# Altium footprint library Connectors.PcbLib: 305 footprints (part 12 of 20)
Each footprint in its own frame and in the unit in brackets; x right, y up, seen from the top. Pads: shape width x height; smd on the part's side, far side on the other; paste and mask are expansions set on the pad; w line width, h text height; cw(c..) or ccw(c..) is an arc to the next point about the centre after c.
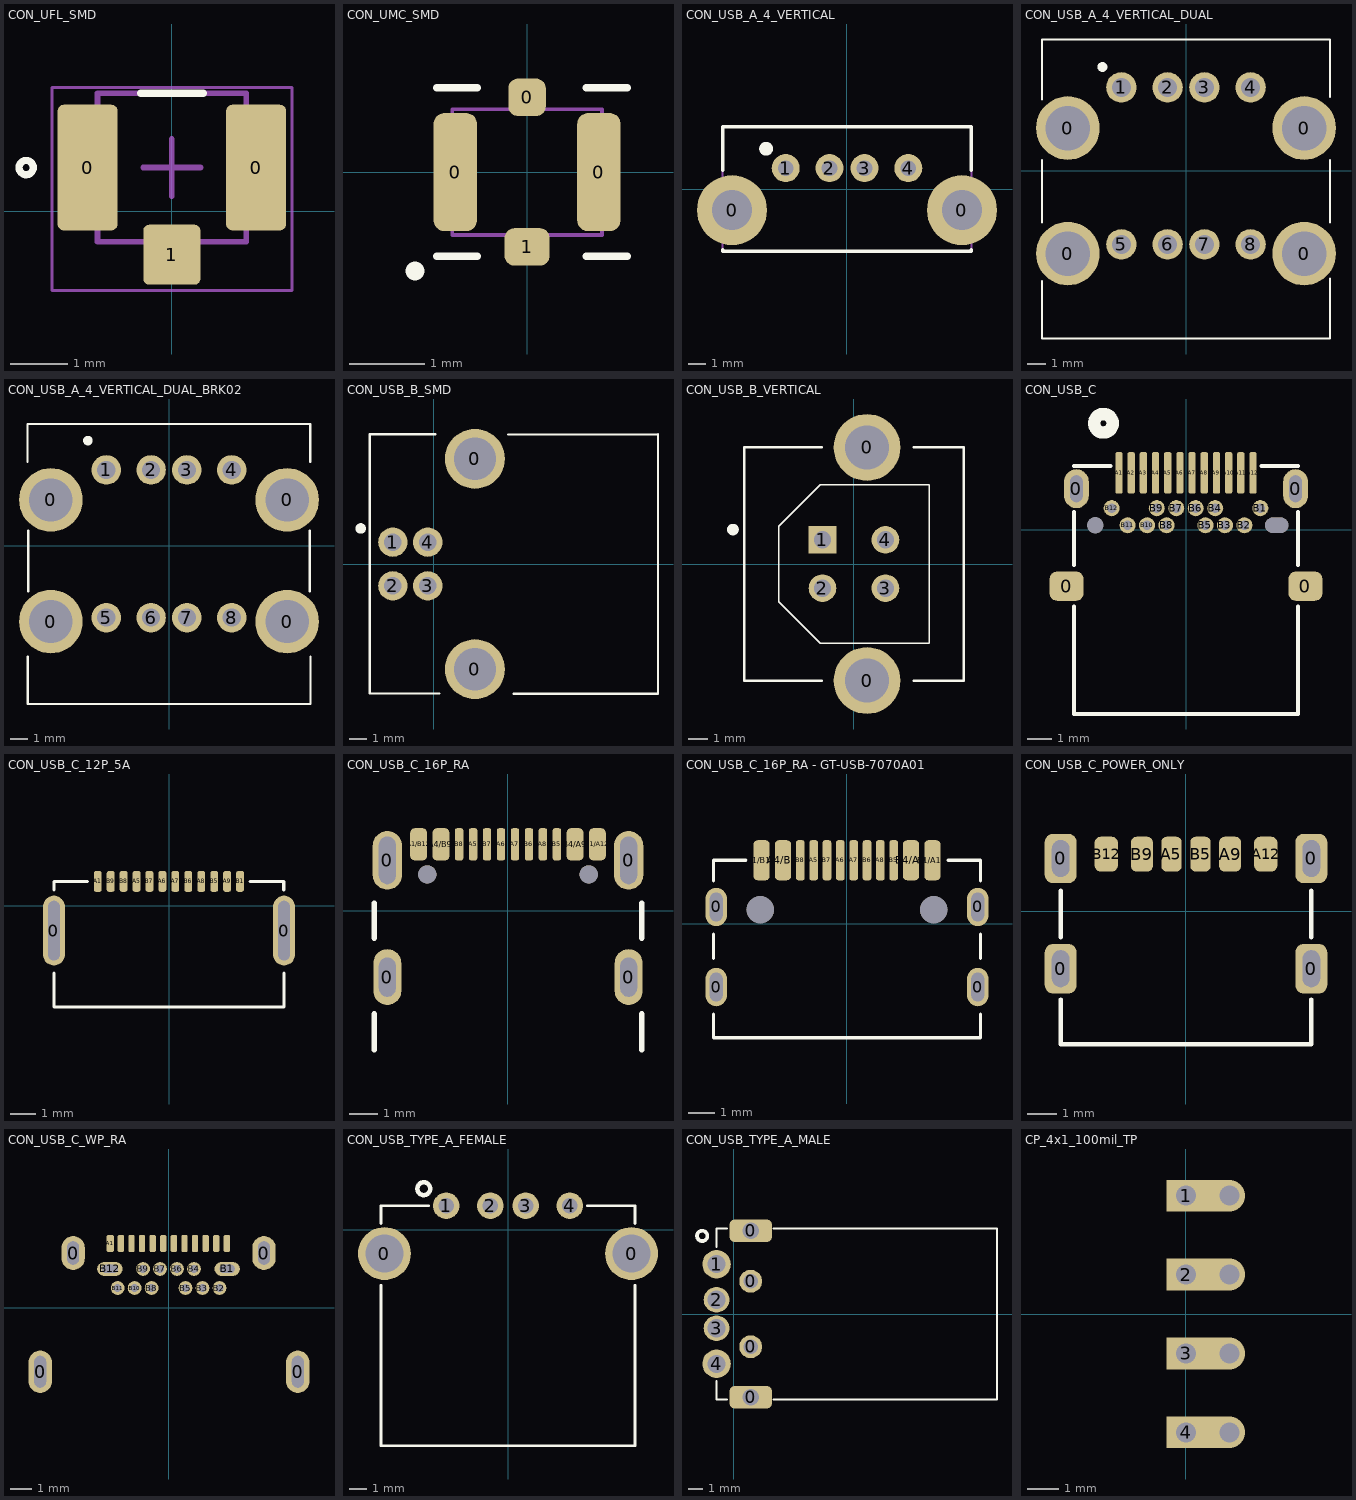
[diagram p11: the footprints below, top view; thin cyan lines are the x and y axes]

## CON_UFL_SMD [mm] "/ 20190503 / M-X.Arias"
pads (3):
  rrect20% 1.05x2.2 smd: 0(-1.475,0.763) 0(1.475,0.763)
  rrect20% 1x1.05 smd: 1(0,-0.762)
Top Overlay:
  circle w0.127: c-2.55,0.763 r0.125
  lines w0.127: -0.55,2.063 0.55,2.063
Mechanical 1:
  lines w0.1: -1.3,-0.537 1.3,-0.537 1.3,2.063 -1.3,2.063 -1.3,-0.537
Mechanical 15:
  lines w0.05: -2.1,-1.387 2.1,-1.387 2.1,2.163 -2.1,2.163 -2.1,-1.387
  lines w0.1: -0.5,0.763 0.5,0.763 ; 0,0.263 0,1.263
3D body: height 0.35, standoff 0, extent -1.3,-0.537 1.3,2.063
3D body: height 1.25, standoff 0, extent -0.992,-0.235 1,1.761

## CON_UMC_SMD [mm] "20211216 / E.Naranjo"
pads (4):
  rrect50% 0.58x1.58 smd: 0(-0.96,0) 0(0.96,0)
  rrect50% 0.5x0.5 smd: 0(0,1)
  rrect50% 0.6x0.5 smd: 1(0,-1)
Top Overlay:
  lines w0.1: -1.208,-1.125 -0.664,-1.125 ; -1.208,1.125 -0.664,1.125 ; 0.792,-1.125 1.336,-1.125 ; 0.792,1.125 1.336,1.125
  lines w0.25: -1.499,-1.322 ccw(c-1.88,-1.321) -1.499,-1.321
Mechanical 1:
  lines w0.05: -1,-0.84 -1,0.84 1,0.84 1,-0.84 -1,-0.84
3D body: height 0.6, standoff 0, extent -1,-0.84 1,0.84

## CON_USB_A_4_VERTICAL [mm] "20210412/M-C.Calderon"
pads (6):
  round 4 hole 2.286: 0(-6.57,-1.2) 0(6.57,-1.2)
  round 1.6 hole 0.889: 1(-3.5,1.2) 2(-1,1.2) 3(1,1.2) 4(3.5,1.2)
Top Overlay:
  circle w0.4: c-4.623,2.305 r0.193
  lines w0.2: -7.112,-3.461 -7.112,-3.562 7.112,-3.562 7.112,-3.461 ; -7.112,1.086 -7.112,3.575 7.112,3.575 7.112,1.086
Top 3D Body (Mech13):
  lines w0.1: -7.112,-3.562 -7.112,3.575 7.112,3.575 7.112,-3.562 -7.112,-3.562
3D body "usb1040-xx-l-b_revb.step": height 13.75, standoff -3.45, extent -7.798,-3.541 7.802,3.579

## CON_USB_A_4_VERTICAL_DUAL [mil] "20230403/N-A.Potosi"
pads (12):
  round 135.83 hole 95: 0(-251.97,-177.17) 0(-251.97,90.55) 0(251.97,-177.17) 0(251.97,90.55)
  round 65 hole 40: 1(-137.79,177.17) 2(-39.38,177.17) 3(39.37,177.17) 4(137.79,177.17) 5(-137.79,-157.48) 6(-39.38,-157.48) 7(39.37,-157.48) 8(137.79,-157.48)
Top Overlay:
  circle w10: c-178.31,220.87 r5.57
  lines w5: -307.09,-236.22 -307.09,-358.27 307.12,-358.27 307.12,-230.51 ; -307.09,-110.24 -307.09,22.64 ; -307.09,151.77 -307.09,279.53 307.12,279.53 307.12,157.48 ; 307.12,-110.24 307.12,22.64
3D body "KUSBVX-AS2N-W-1_A.STEP": height 657.48, standoff -153.54, extent -307.08,-358.26 307.1,279.53

## CON_USB_A_4_VERTICAL_DUAL_BRK02 [mil] "20221118/N-A.Potosi"
pads (12):
  round 140 hole 95: 0(-259.84,-166.79) 0(-259.84,100.93) 0(259.84,-166.79) 0(259.84,100.93)
  round 65 hole 40: 1(-137.79,166.79) 2(-39.38,166.79) 3(39.37,166.79) 4(137.79,166.79) 5(-137.79,-158.01) 6(-39.38,-158.01) 7(39.37,-158.01) 8(137.79,-158.01)
Top Overlay:
  circle w10: c-178.31,231.24 r5.57
  lines w5: -311.3,185.04 -311.3,267.72 310.8,267.72 310.8,185.04 ; -310.6,-244.09 -310.6,-347.89 310.97,-347.89 310.97,-244.09 ; -309.34,-99.86 -309.34,33.01 ; 309.34,-99.86 309.34,33.01
Bottom Overlay:
  circle w10: c-178.47,231.46 r5.57
3D body "690n208-244-021.STEP": height 681.02, standoff -146.46, extent -310.59,-340.81 310.59,274.94

## CON_USB_B_SMD [mil] "/20210831/N-A.Potosi"
pads (6):
  round 135 hole 95: 0(92.5,-237) 0(92.5,237)
  round 66 hole 40: 1(-92.5,49.21) 2(-92.5,-49.21) 3(-13.76,-49.21) 4(-13.76,49.21)
Top Overlay:
  circle w11.81: c-165.02,80 r5.91
  lines w5: 3,292.23 -144.67,292.23 -144.67,-292 12,-292 ; 167,292 504.92,292 504.92,292.23 504.92,-292.22 180.13,-292.22
3D body "USB 2.0 Type B Connector Right Angle (Wurth 61400416121).stp": height 418.61, standoff -147.7, extent -144.67,-292.22 504.92,292.23

## CON_USB_B_VERTICAL [mm] "/20230427/A-F. Romo"
pads (6):
  round 3.45 hole 2.286: 0(0.675,-6.02) 0(0.675,6.02)
  rect 1.428x1.428 hole 0.889: 1(-1.625,1.25)
  round 1.428 hole 0.889: 2(-1.625,-1.25) 3(1.625,-1.25) 4(1.625,1.25)
Top Overlay:
  circle w0.3: c-6.248,1.778 r0.15
  lines w0.076: -3.89,-1.95 -3.89,1.95 -1.751,4.089 3.89,4.089 3.89,-4.089 -1.751,-4.089 -3.89,-1.95
  lines w0.127: -1.651,-6.02 -5.664,-6.02 -5.664,6.02 -1.651,6.02 ; 3.099,-6.02 5.68,-6.02 5.68,6.02 3.099,6.02
3D body "usb model part.stp": height 4.95, standoff -16.8, extent -5.3,-7.064 5.3,7.064

## CON_USB_C [mm] "/20210301/V-A.Patino"
pads (30):
  rrect50% 1.4x1.2 smd: 0(-4.9,-2.325) 0(4.9,-2.325)
  oval 1.016x1.6 hole 0.508 slot 1.1 at 90 deg mask+0: 0(-4.5,1.675) 0(4.5,1.675)
  rrect50% 0.3x1.7 smd: A1(-2.751,2.325) A2(-2.251,2.325) A3(-1.75,2.325) A4(-1.25,2.325) A5(-0.75,2.325) A6(-0.25,2.325) A7(0.25,2.325) A8(0.75,2.325) A9(1.25,2.325) A10(1.75,2.325) A11(2.251,2.325) A12(2.751,2.325)
  round 0.66 hole 0.381 mask+0: B1(3.051,0.875) B2(2.401,0.175) B3(1.6,0.175) B4(1.2,0.875) B5(0.8,0.175) B6(0.4,0.875) B7(-0.4,0.875) B8(-0.8,0.175) B9(-1.2,0.875) B10(-1.6,0.175) B11(-2.401,0.175) B12(-3.051,0.875)
  oval 0.635x0.66 hole 0.66 unplated mask+0: ""(-3.725,0.175)
  oval 0.95x0.65 hole 0.635 slot 0.95 at 0 deg unplated paste-2539.97 mask+0: ""(3.725,0.175)
Top Overlay:
  circle w0.508: c-3.39,4.362 r0.381
  lines w0.152: -4.6,-3.158 -4.6,-7.575 4.6,-7.575 4.6,-3.158 ; -4.6,-1.468 -4.6,0.722 ; -4.6,2.612 -3.089,2.612 ; 3.089,2.612 4.6,2.612 ; 4.6,-1.468 4.6,0.722
3D body: height 3.42, standoff 0, extent -4.6,-7.575 4.6,2.612

## CON_USB_C_12P_5A [mm] "20220712 / E.Naranjo"
pads (14):
  oval 0.85x2.7 hole 0.45 slot 2.3 at 90 deg: 0(-4.445,-0.95) 0(4.445,-0.95)
  rrect50% 0.3x0.8 smd mask+0.102: A1(-2.755,0.95) A5(-1.255,0.95) A6(-0.255,0.95) A7(0.245,0.95) A8(1.245,0.95) A9(2.245,0.95) B1(2.745,0.95) B5(1.745,0.95) B6(0.745,0.95) B7(-0.755,0.95) B8(-1.755,0.95) B9(-2.255,0.95)
Top Overlay:
  lines w0.127: -4.445,-2.6 -4.445,-3.9 4.445,-3.9 4.445,-2.6 ; -4.445,0.624 -4.445,0.95 -3.145,0.95 ; 3.135,0.95 4.435,0.95 4.435,0.624
3D body "3410-3CJRC9XKSX(TYPE C 12P short body L=4.75).stp": height 3.17, standoff -0.89, extent -4.55,-3.9 4.55,1.15

## CON_USB_C_16P_RA [mm] "20220527 / E.Naranjo"
pads (18):
  oval 1x2 hole 0.6 slot 1.4 at 90 deg: 0(-4.32,-2.377) 0(4.32,-2.377)
  oval 1.05x2.1 hole 0.6 slot 1.7 at 90 deg: 0(-4.32,1.803) 0(4.32,1.803)
  rrect50% 0.6x1.15 smd: A1/B12(-3.2,2.378) A4/B9(-2.4,2.378) B1/A12(3.2,2.378) B4/A9(2.4,2.378)
  rrect50% 0.3x1.15 smd: A5(-1.25,2.378) A6(-0.25,2.378) A7(0.25,2.378) A8(1.25,2.378) B5(1.75,2.378) B6(0.75,2.378) B7(-0.75,2.378) B8(-1.75,2.378)
  round 0.65 hole 0.65 unplated: ""(-2.89,1.303) ""(2.89,1.303)
Top Overlay:
  lines w0.2: -4.79,-4.977 -4.79,-3.697 ; -4.79,-0.977 -4.79,0.273 ; 4.79,-4.977 4.79,-3.697 ; 4.79,-0.977 4.79,0.273
3D body "step_temp.STEP": height 3.31, standoff -0.85, extent -4.79,-4.977 4.79,2.733

## CON_USB_C_16P_RA - GT-USB-7070A01 [mm] "20230822 / N-A.Potosi"
pads (18):
  oval 0.8x1.44 hole 0.48 slot 1.08 at 90 deg: 0(-4.9,-2.375) 0(-4.9,0.625) 0(4.9,-2.375) 0(4.9,0.625)
  rrect50% 0.61x1.5 smd: A1/B12(-3.2,2.375) A4/B9(-2.4,2.375) B1/A12(3.2,2.375) B4/A9(2.4,2.375)
  rrect50% 0.32x1.5 smd: A5(-1.25,2.375) A6(-0.25,2.375) A7(0.25,2.375) A8(1.25,2.375) B5(1.75,2.375) B6(0.75,2.375) B7(-0.75,2.375) B8(-1.75,2.375)
  round 1.02 hole 1.02 unplated: ""(-3.25,0.525) ""(3.25,0.525)
Top Overlay:
  lines w0.127: -5,-3.4 -5,-4.275 5,-4.275 5,-3.4 ; -5,-1.3 -5,-0.4 ; -5,1.6 -5,2.375 -3.8,2.375 ; 3.8,2.375 5,2.375 5,1.6 ; 5,-1.3 5,-0.4
3D body "GT-USB-7070A01(带防水圈）.STEP": height 4.81, standoff -1.2, extent -5.307,-5.772 5.333,2.878

## CON_USB_C_POWER_ONLY [mm] "/20210318/V-A.Patino"
pads (10):
  rrect50% 1.1x1.7 hole 1.27 slot 0.6 at 0 deg: 0(-4.32,-1.975) 0(-4.32,1.825) 0(4.32,-1.975) 0(4.32,1.825)
  rrect50% 0.7x1.2 smd: A5(-0.5,1.975) B5(0.5,1.975)
  rrect50% 0.76x1.2 smd: A9(1.52,1.975) B9(-1.52,1.975)
  rrect50% 0.8x1.2 smd: A12(2.75,1.975) B12(-2.75,1.975)
Top Overlay:
  lines w0.152: -4.32,-3.035 -4.32,-4.575 4.32,-4.575 4.32,-3.035 ; -4.32,-0.895 -4.32,0.715 ; 4.32,-0.895 4.32,0.715
3D body: height 3.21, standoff 0, extent -4.32,-4.575 4.32,2.225

## CON_USB_C_WP_RA [mm] "/20210826/J-E.Pachon"
pads (28):
  oval 1.1x2 hole 0.55 slot 1.5 at 90 deg mask+0: 0(-6.073,-3.025) 0(6.073,-3.025)
  oval 1.1x1.6 hole 0.55 slot 1.1 at 90 deg mask+0: 0(-4.521,2.575) 0(4.479,2.575)
  rrect50% 0.35x0.8 smd: A1(-2.772,3.025)
  rrect50% 0.3x0.8 smd: A2(-2.272,3.025) A3(-1.771,3.025) A4(-1.271,3.025) A5(-0.772,3.025) A6(-0.272,3.025) A7(0.228,3.025) A8(0.728,3.025) A9(1.228,3.025) A10(1.728,3.025) A11(2.228,3.025) A12(2.728,3.025)
  oval 1.2x0.65 hole 0.381 slot 0.7 at 0 deg mask+0: B1(2.743,1.825)
  round 0.65 hole 0.381 mask+0: B2(2.38,0.925) B3(1.579,0.925) B4(1.179,1.825) B5(0.779,0.925) B6(0.379,1.825) B7(-0.421,1.825) B8(-0.821,0.925) B9(-1.221,1.825) B10(-1.621,0.925) B11(-2.422,0.925)
  oval 1.2x0.65 hole 0.381 slot 0.75 at 0 deg mask+0: B12(-2.787,1.825)
3D body "TYPE-C-31-E-12.step": height 2.53, standoff -1.89, extent -6.119,-6.665 6.081,3.325

## CON_USB_TYPE_A_FEMALE [mm] "/20210420/V-A.Patino"
pads (6):
  round 3 hole 2.159 unplated: 0(-7,-1.355) 0(7,-1.355)
  round 1.5 hole 0.889 unplated: 1(-3.5,1.355) 2(-1,1.355) 3(1,1.355) 4(3.5,1.355)
Top Overlay:
  circle w0.254: c-4.775,2.32 r0.364
  lines w0.152: -7.2,-3.145 -7.2,-12.245 7.2,-12.245 7.2,-3.145 ; -7.2,0.353 -7.2,1.355 -4.5,1.355 ; 4.5,1.355 7.2,1.355 7.2,0.353
3D body: height 6.95, standoff 0, extent -7.2,-12.245 7.2,1.355

## CON_USB_TYPE_A_MALE [mm] "/20210420/V-A.Patino"
pads (8):
  rrect50% 3x1.6 hole 1.143 square unplated: 0(1.2,-5.85) 0(1.2,5.85)
  round 1.6 hole 1.016 unplated: 0(1.2,-2.3) 0(1.2,2.3)
  round 2 hole 1.27 unplated: 1(-1.2,3.5) 4(-1.2,-3.5)
  round 1.8 hole 1.27 unplated: 2(-1.2,1) 3(-1.2,-1)
Top Overlay:
  circle w0.254: c-2.21,5.486 r0.364
  lines w0.152: -1.2,-4.7 -1.2,-6 -0.457,-6 ; -1.2,4.7 -1.2,6 -0.457,6 ; 2.819,-6 18.5,-6 18.5,6 2.819,6
3D body: height 4.5, standoff 0, extent -1.2,-6 18.5,6

## CP_4x1_100mil_TP [mil] "/ 20200103/ C-A.Serna.A"
pads (4):
  rect 80x40 hole 25 copper offset 15,0 paste-99999: 1(0,150) 2(0,50) 3(0,-50) 4(0,-150)
via 55,150 diameter 40 hole 25
via 55,50 diameter 40 hole 25
via 55,-50 diameter 40 hole 25
via 55,-150 diameter 40 hole 25